# EAGLE library part HD-EMB1204-SM (library HD-EMB1204-SM)
12X4MM ERM HAPTIC 12000RPM Source: Datasheet <https://api.puiaudio.com/filename/HD-EMB1204-SM.pdf>
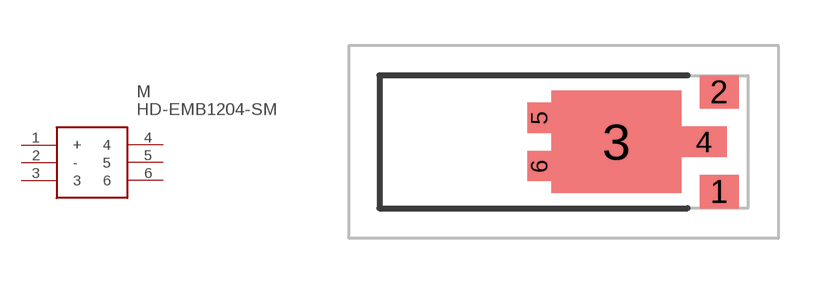
[diagram p0: symbol with the pads of HDEMB1204SM; footprint HDEMB1204SM]

Designator prefix M

## HD-EMB1204-SM (Description: 12X4MM ERM HAPTIC 12000RPM; Height: 3.6mm; Manufacturer_Name: PUI Audio; Manufacturer_Part_Number: HD-EMB1204-SM; Mouser_Part_Number: 665-HD-EMB1204-SM; Mouser_Price-Stock: https://www.mouser.co.uk/ProductDetail/PUI-Audio/HD-EMB1204-SM?qs=9vOqFld9vZVRpcI8oM%2FXRA%3D%3D)  [HDEMB1204SM]
1  +
2  -
3  3
4  4
5  5
6  6

## Footprint HDEMB1204SM (pad centres in mm)
HD-EMB1204-SM
smd 1.3 x 1.1: 1 5.15,-1.65; 2 5.15,1.65
smd 4.3 x 3.4: 3 1.75,0
smd 1.5 x 1: 4 4.65,0
smd 0.8 x 1: 5 -0.8,0.8; 6 -0.8,-0.8